# Altium footprint library SamacSys.PcbLib: 1008 footprints (part 62 of 63)
Each footprint in its own frame and in the unit in brackets; x right, y up, seen from the top. Pads: shape width x height; smd on the part's side, far side on the other; paste and mask are expansions set on the pad; w line width, h text height; cw(c..) or ccw(c..) is an arc to the next point about the centre after c.
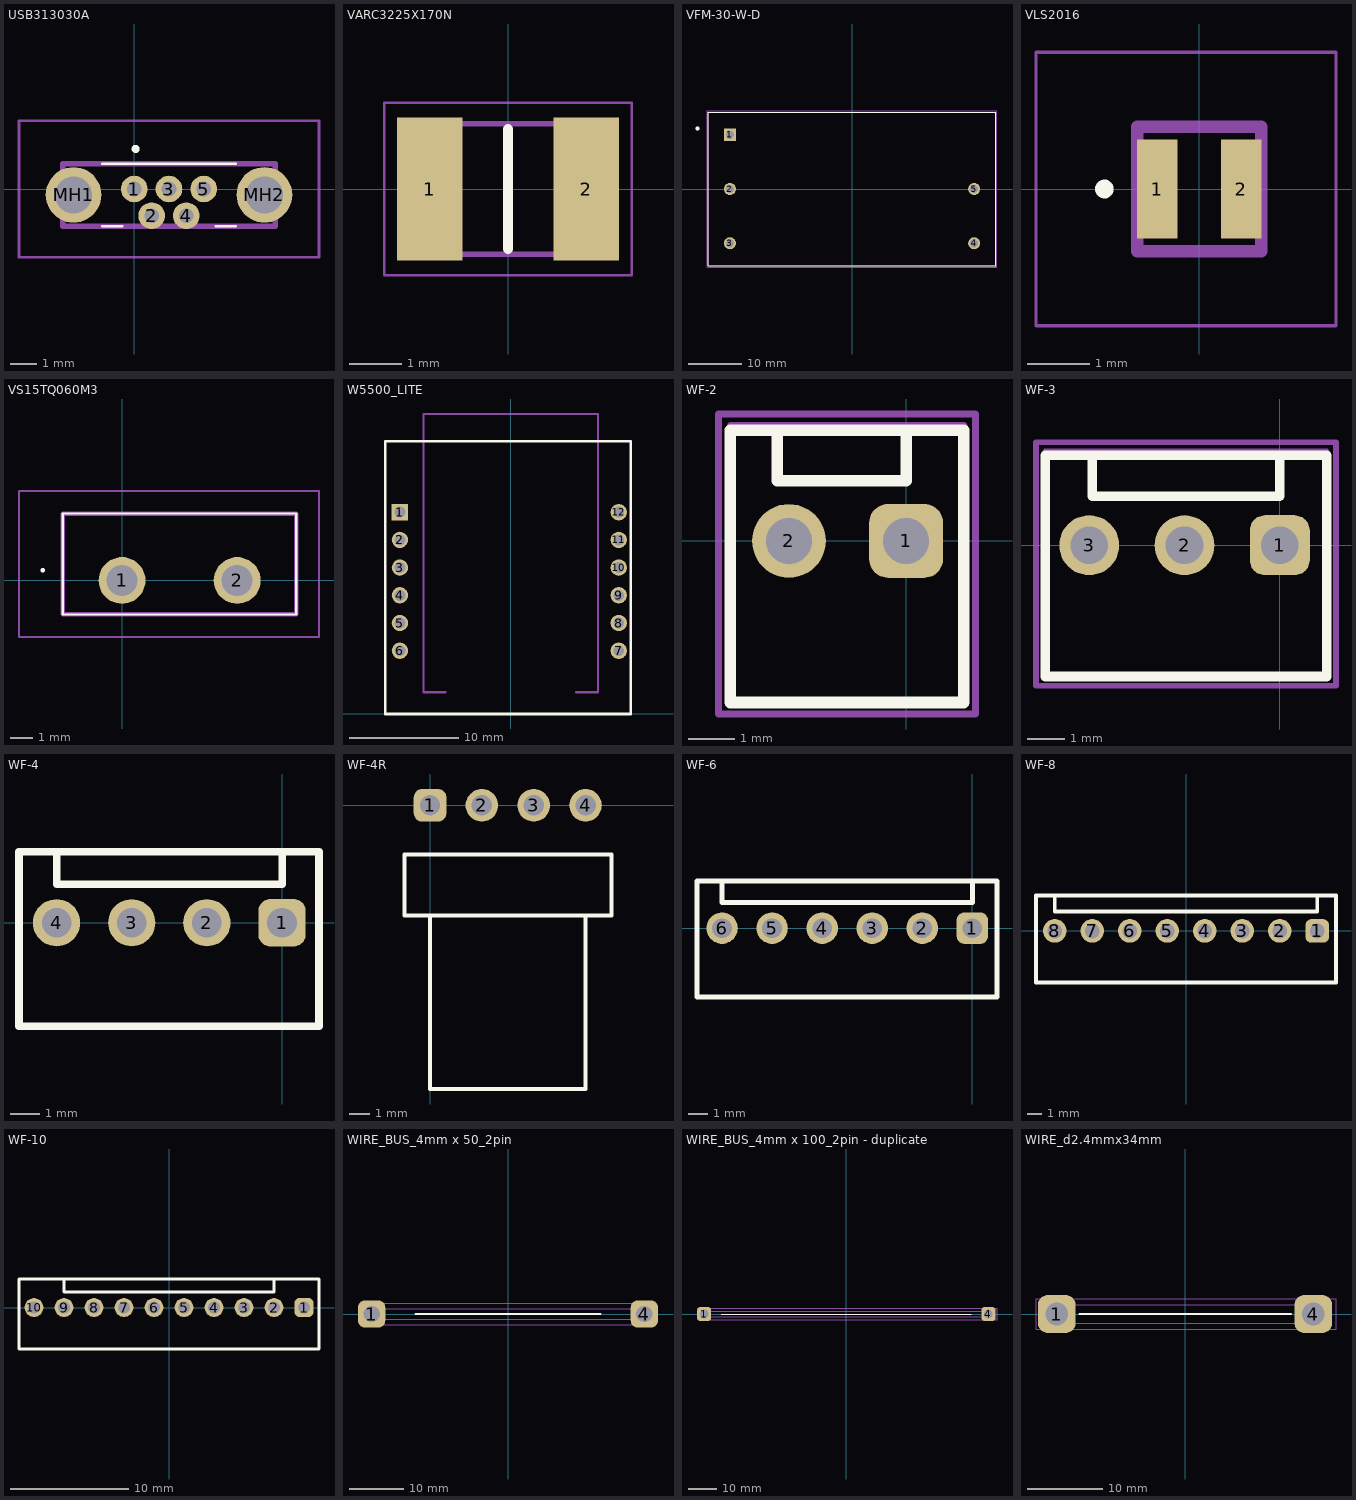
[diagram p61: the footprints below, top view; thin cyan lines are the x and y axes]

## USB313030A [mm]
pads (7):
  round 1 hole 0.55: 1(0,0) 2(0.65,-1) 3(1.3,0) 4(1.95,-1) 5(2.6,0)
  round 2.085 hole 1.39: MH1(-2.275,-0.22) MH2(4.875,-0.22)
Top Overlay:
  lines w0.1: -1.2,-1.4 -0.45,-1.4 -1.2,-1.4 ; -1.2,0.95 3.8,0.95 -1.2,0.95 ; 3.05,-1.4 3.8,-1.4 3.05,-1.4
  lines w0.2: 0,1.5 ccw(c0.05,1.5) 0.1,1.5 ; 0,1.5 cw(c0.05,1.5) 0.1,1.5 ; 0,1.5 ccw(c0.05,1.5) 0.1,1.5
Assembly:
  lines w0.2: -2.68,-1.4 5.28,-1.4 5.28,0.95 -2.68,0.95 -2.68,-1.4
Countryard:
  lines w0.1: -4.317,-2.55 6.918,-2.55 6.918,2.55 -4.317,2.55 -4.317,-2.55
3D body "USB3130-30-A.stp": height 5.7, standoff -5, extent -2.87,-1.4 5.47,0.95

## VARC3225X170N [mm]
pads (2):
  rect 1.25x2.75 smd: 1(-1.5,0) 2(1.5,0)
Top Overlay:
  lines w0.2: 0,-1.15 0,1.15
Assembly:
  lines w0.1: -1.6,-1.25 -1.6,1.25 1.6,1.25 1.6,-1.25 -1.6,-1.25
Countryard:
  lines w0.05: -2.375,-1.65 -2.375,1.65 2.375,1.65 2.375,-1.65 -2.375,-1.65
3D body "B72530T0300K062.stp": height 1.7, standoff 0, extent -1.6,-1.25 1.6,1.25

## VFM-30-W-D [mm] "DC EMI FILTER"
height 19
pads (5):
  rect 2.25x2.25 hole 1.5: 1(-22.86,10.16)
  round 2.25 hole 1.5: 2(-22.86,0) 3(-22.86,-10.16) 4(22.86,-10.16) 5(22.86,0)
Top Overlay:
  circle w0.508: c-28.93,11.33 r0.1
  lines w0.127: -26.9,-14.4 -26.9,14.4 26.9,14.4 26.9,-14.4 -26.9,-14.4
Assembly:
  circle w0.508: c-28.93,11.33 r0.1
  lines w0.127: -26.9,-14.4 -26.9,14.4 26.9,14.4 26.9,-14.4 -26.9,-14.4
Countryard:
  lines w0.05: -27.15,-14.65 -27.15,14.65 27.15,14.65 27.15,-14.65 -27.15,-14.65
3D body "CUI_VFM-30-W-D.step": height 19.1, standoff -5.9, extent -26.9,-14.4 26.9,14.4

## VLS2016 [mm]
pads (2):
  rect 0.65x1.6 smd: 1(-0.675,0) 2(0.675,0)
Top Overlay:
  circle w0.2: c-1.525,0 r0.05
Assembly:
  lines w0.2: -1,-1 -1,1 1,1 1,-1 -1,-1
Countryard:
  lines w0.05: -2.625,-2.2 -2.625,2.2 2.2,2.2 2.2,-2.2 -2.625,-2.2
3D body "VLS201612CX-220M.stp": height 0.99, standoff -0.01, extent -1,-0.8 1,0.8

## VS15TQ060M3 [mm]
pads (2):
  round 2.07 hole 1.38: 1(0,0) 2(5.08,0)
Top Overlay:
  lines w0.1: -3.5,0.4 cw(c-3.5,0.45) -3.5,0.5 cw(c-3.5,0.45) -3.5,0.4 ; -2.615,-1.498 7.695,-1.498 7.695,2.953 -2.615,2.953 -2.615,-1.498
Assembly:
  lines w0.2: -2.615,-1.498 7.695,-1.498 7.695,2.953 -2.615,2.953 -2.615,-1.498
Countryard:
  lines w0.1: -4.55,-2.498 8.695,-2.498 8.695,3.953 -4.55,3.953 -4.55,-2.498
3D body "VS-15TQ060-M3.stp": height 18.83, standoff -10.02, extent -2.6,-1.63 7.58,2.92

## W5500_LITE [mm]
height 10
pads (12):
  rect 1.5x1.5 hole 1: 1(-10.16,18.5)
  round 1.5 hole 1: 2(-10.16,15.96) 3(-10.16,13.42) 4(-10.16,10.88) 5(-10.16,8.34) 6(-10.16,5.8) 7(9.906,5.8) 8(9.906,8.34) 9(9.906,10.88) 10(9.906,13.42) 11(9.906,15.96) 12(9.906,18.5)
Top Overlay:
  lines w0.25: -11.5,0 11,0 11,25 -11.5,25 -11.5,0
Top Assembly:
  lines w0.2: -6,2 -8,2 -8,27.5 8,27.5 8,2 6,2
Assembly:
  lines w0.1: -11.5,0 -11.5,25 11,25 11,0 -11.5,0
Countryard:
  lines w0.1: -11.5,0 11,0 11,25 -11.5,25 -11.5,0
3D body "User Library-PBS_(DS1023)_1line_connectors_h=5_0_8_5mm_step_2_54mm-1.step": height 5, standoff -3.3, extent 8.656,4.271 11.156,20.011
3D body "User Library-PBS_(DS1023)_1line_connectors_h=5_0_8_5mm_step_2_54mm-1.step": height 5, standoff -3.3, extent -11.435,4.271 -8.935,20.011
3D body "Lite_w5500.step": height 24.73, standoff -0.6, extent -11.8,0 11.2,27.5

## WF-2 [mm]
pads (2):
  rrect50% 1.6x1.6 hole 1: 1(0,0)
  round 1.6 hole 1: 2(-2.54,0)
Top Overlay:
  lines w0.254: -2.794,2.4 -2.794,1.305 0,1.305 0,2.4 ; -3.81,-3.5 -3.81,2.4 1.25,2.4 1.25,-3.5 -3.81,-3.5
Top Designator:
  text ".Designator" at -8.888,-0.508 h1.52
Assembly:
  lines w0.15: -3.81,-3.5 -3.81,2.5 1.25,2.5 1.25,-3.5
Countryard:
  lines w0.15: -4.064,-3.75 -4.064,2.75 1.5,2.75 1.5,-3.75 -4.064,-3.75
3D body "DS1070-2 (WF-2 CONNFLY).stp": height 11.45, standoff -3.25, extent -3.81,-3.458 1.27,2.442

## WF-3 [mm]
pads (3):
  rrect50% 1.6x1.6 hole 1: 1(0,0)
  round 1.6 hole 1: 2(-2.54,0) 3(-5.08,0)
Top Overlay:
  lines w0.254: -5,2.4 -5,1.305 0,1.305 0,2.4 ; -6.25,-3.5 -6.25,2.4 1.25,2.4 1.25,-3.5 -6.25,-3.5
Top Designator:
  text ".Designator" at -10.118,-0.508 h1.52
Assembly:
  lines w0.15: -6.25,-3.5 -6.25,2.5 1.25,2.5 1.25,-3.5
Countryard:
  lines w0.15: -6.5,-3.75 -6.5,2.75 1.5,2.75 1.5,-3.75 -6.5,-3.75
3D body "DS1070-3 (WF-3 CONNFLY).stp": height 11.45, standoff -3.25, extent -6.31,-3.5 1.31,2.4

## WF-4 [mm]
pads (4):
  rrect50% 1.6x1.6 hole 1: 1(0,0)
  round 1.6 hole 1: 2(-2.54,0) 3(-5.08,0) 4(-7.62,0)
Top Overlay:
  lines w0.254: -7.62,2.4 -7.62,1.305 0,1.305 0,2.4 ; -8.89,-3.5 1.25,-3.5 1.25,2.4 -8.89,2.4 -8.89,-3.5
Top Designator:
  text ".Designator" at -12.698,-0.508 h1.52
3D body "wf-4.step": height 11.4, standoff -3.3, extent -8.89,-3.458 1.27,2.442

## WF-4R [mm]
pads (4):
  rrect50% 1.6x1.6 hole 1: 1(0,0)
  round 1.6 hole 1: 2(2.54,0) 3(5.08,0) 4(7.62,0)
Top Overlay:
  lines w0.2: 0,-5.4 0,-13.9 7.62,-13.9 7.62,-5.4 ; -1.25,-5.4 8.89,-5.4 8.89,-2.4 -1.25,-2.4 -1.25,-5.4
Top Designator:
  text ".Designator" at -5.118,0.992 h1.52
3D body "WF-04R.stp": height 5.9, standoff -3.4, extent -1.27,-13.78 8.89,0.32

## WF-6 [mm]
pads (6):
  rrect50% 1.6x1.6 hole 1: 1(0,0)
  round 1.6 hole 1: 2(-2.54,0) 3(-5.08,0) 4(-7.62,0) 5(-10.16,0) 6(-12.7,0)
Top Overlay:
  lines w0.254: -12.7,2.4 -12.7,1.305 0,1.305 0,2.4 ; -13.97,-3.5 1.25,-3.5 1.25,2.4 -13.97,2.4 -13.97,-3.5
Top Designator:
  text ".Designator" at -12.698,-0.508 h1.52
3D body "DS1070-6 (WF-6 CONNFLY).stp": height 11.4, standoff -3.3, extent -14.12,-3.4 1.12,2.5

## WF-8 [mm]
pads (8):
  rrect50% 1.6x1.6 hole 1: 1(8.89,0)
  round 1.6 hole 1: 2(6.35,0) 3(3.81,0) 4(1.27,0) 5(-1.27,0) 6(-3.81,0) 7(-6.35,0) 8(-8.89,0)
Top Overlay:
  lines w0.254: -8.89,2.4 -8.89,1.305 8.89,1.305 8.89,2.4 ; -10.16,-3.5 -10.16,2.4 10.16,2.4 10.16,-3.5 -10.16,-3.5
Top Designator:
  text ".Designator" at -12.698,-0.508 h1.52
3D body "DS1070-8 (WF-8 CONNFLY).stp": height 11.4, standoff -3.3, extent -10.16,-3.5 10.16,2.4

## WF-10 [mm]
pads (10):
  rrect50% 1.6x1.6 hole 1: 1(11.43,0)
  round 1.6 hole 1: 2(8.89,0) 3(6.35,0) 4(3.81,0) 5(1.27,0) 6(-1.27,0) 7(-3.81,0) 8(-6.35,0) 9(-8.89,0) 10(-11.43,0)
Top Overlay:
  lines w0.254: -8.89,2.4 -8.89,1.305 8.89,1.305 8.89,2.4 ; -12.7,-3.5 12.7,-3.5 12.7,2.4 -12.7,2.4 -12.7,-3.5
Top Designator:
  text ".Designator" at -12.698,-0.508 h1.52
3D body "DS1070-10 (WF-10 CONNFLY).stp": height 11.45, standoff -3.25, extent -12.809,-3.5 12.591,2.4

## WIRE_BUS_4mm x 50_2pin [mm] "ВВГ 1х4 50mm 2pin"
height 4
pads (2):
  rrect50% 5x5 hole 3: 1(-25,0) 4(25,0)
Top Overlay:
  lines w0.3: -17,0 17,0
Assembly:
  lines w0.1: -23,-1 23,-1 23,1 -23,1 -23,-1
Countryard:
  lines w0.1: -25,-2 25,-2 25,2 -25,2 -25,-2
3D body "bus_1x3x49_high_2pin.STEP": height 9.1, standoff -1.9, extent -24.5,-0.5 24.5,0.5

## WIRE_BUS_4mm x 100_2pin - duplicate [mm] "ВВГ 1х4 100mm 2pin"
height 4
pads (2):
  rrect50% 5x5 hole 3: 1(-50,0) 4(50,0)
Top Overlay:
  lines w0.3: -44,0 44,0
Assembly:
  lines w0.1: -51,-1 -51,1 52,1 52,-1 -51,-1
Countryard:
  lines w0.1: -52,-2 53,-2 53,2 -52,2 -52,-2
3D body "bus_1x3x100_3pin.STEP": height 5, standoff 0, extent -47,-0.5 55,0.5

## WIRE_d2.4mmx34mm [mm] "ПЭТВ-2 d2.5mm х 34mm"
height 4
pads (2):
  rrect50% 5x5 hole 3: 1(-17,0) 4(17,0)
Top Overlay:
  lines w0.3: -14,0 14,0
Assembly:
  lines w0.1: -17.75,-1.25 -17.75,1.25 18,1.25 18,-1.25 -17.75,-1.25
Countryard:
  lines w0.1: -19.75,-2 20,-2 20,2 -19.75,2 -19.75,-2
3D body "ПЭТВ2_34.SLDPRT": height 9.24, standoff -2, extent -18.241,-1.25 18.241,1.25